# Altium schematic symbol library SSK02-FPH-254-A19.SchLib: 1 symbol
Pins are listed as number, name and electrical type; pins without a type are passive.

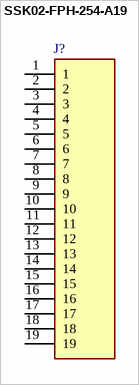
[diagram p0: symbol SSK02-FPH-254-A19]

## SSK02-FPH-254-A19
designator J?  (value not drawn)
2.54 mm Female Header, 1 x 19 Pin, Straight, PA6T, Gold Flash, Rectangular Connector; Manufacturer_Name: Same Sky; Geometry.Height: 8.7mm; Mouser Part Number: *; Mouser Price/Stock: *; Manufacturer_Part_Number: SSK02-FPH-254-A19; Datasheet Link: https://www.sameskydevices.com/product/resource/ssk02-fph-254.pdf
footprint RHDR19W69P0X254_1X19_4876X250X870P
pins: 1, 2, 3, 4, 5, 6, 7, 8, 9, 10, 11, 12, 13, 14, 15, 16, 17, 18, 19